# Altium schematic symbol library Switch,Tactile,SPST-NO,RA,TH,TS36CA-0.6 250gf 031.Schlib: 1 symbol
Pins are listed as number, name and electrical type; pins without a type are passive.

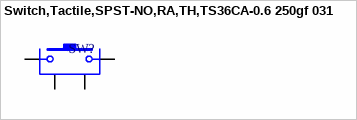
[diagram p0: symbol Switch,Tactile,SPST-NO,RA,TH,TS36CA-0.6 250gf 031]

## Switch,Tactile,SPST-NO,RA,TH,TS36CA-0.6 250gf 031
designator SW?
pins: 0, 0, 1, 2